# EAGLE library part 215876-1 (library 215876-1(1))
Check availability <https://pricing.snapeda.com/parts/215876-1/TE%20Connectivity/view-part?ref=eda>
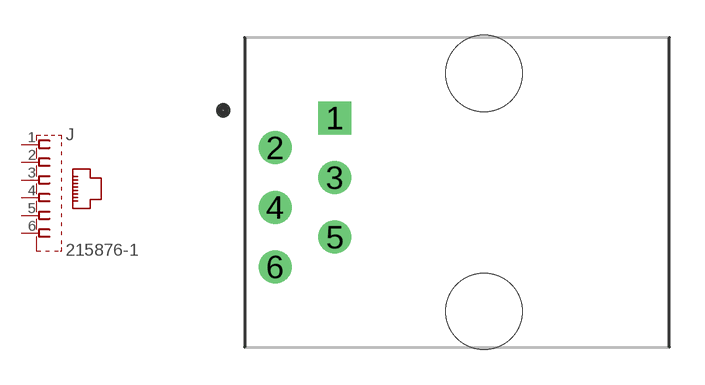
[diagram p0: symbol with the pads of TE_215876-1; footprint TE_215876-1]

Designator prefix J

## 215876-1 (AVAILABILITY: In Stock; CHECK_PRICES: https://www.snapeda.com/parts/215876-1/TE+Connectivity+AMP+Connectors/view-part/?ref=eda; COMMENT: 215876-1; DESCRIPTION: Conector modular Jack 6p6c (RJ11, RJ12, RJ14, RJ25) Ángulo de 90° (derecha) Sin blindaje Cat3; EU_ROHS_COMPLIANCE: Compliant; MF: TE Connectivity; MP: 215876-1; PACKAGE: None; PRICE: None; SNAPEDA_LINK: https://www.snapeda.com/parts/215876-1/TE+Connectivity+AMP+Connectors/view-part/?ref=snap)  [TE_215876-1]
1  1  pas
2  2  pas
3  3  pas
4  4  pas
5  5  pas
6  6  pas

## Footprint TE_215876-1 (pad centres in mm)
drill 0.9 square: 1 0,3.17
drill 0.9: 2 -2.54,1.9; 3 0,0.63; 4 -2.54,-0.64; 5 0,-1.91; 6 -2.54,-3.18
hole 3.25 at 6.36,-5.08
hole 3.25 at 6.36,5.08